# Altium schematic symbol library SSA34-E35AT.SchLib: 1 symbol
Pins are listed as number, name and electrical type; pins without a type are passive.

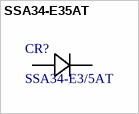
[diagram p0: symbol SSA34-E35AT]

## SSA34-E35AT
designator CR?, comment SSA34-E3/5AT
3A,40V,SMA SKY RECT; Manufacturer_Name: Vishay; Copyright: Copyright (C) 2026 Ultra Librarian. All rights reserved.; Manufacturer_Part_Number: SSA34-E3/5AT
footprint CR_A34-E35AT_VIS
pins: 1, 2